# Altium footprint library HEF4071BP.PcbLib: 1 footprints
Each footprint in its own frame and in the unit in brackets; x right, y up, seen from the top. Pads: shape width x height; smd on the part's side, far side on the other; paste and mask are expansions set on the pad; w line width, h text height; cw(c..) or ccw(c..) is an arc to the next point about the centre after c.
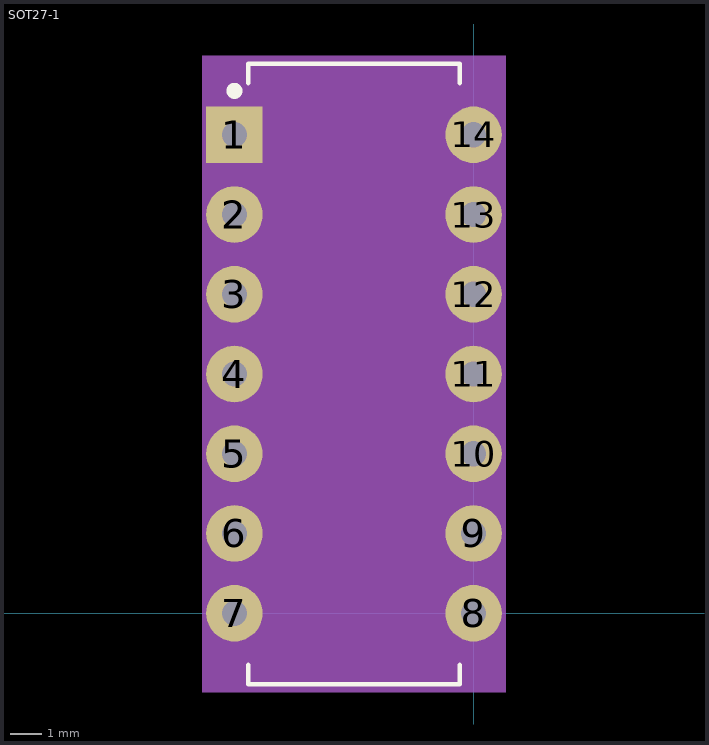
[diagram p0: the footprint, top view; thin cyan lines are the x and y axes]

## SOT27-1 [mm]
pads (14):
  rect 1.8x1.8 / inner rect 1.295x1.295 / far side rect 1.295x1.295 hole 0.8: 1(-7.62,15.24)
  round 1.8 / inner round 1.295 / far side round 1.295 hole 0.8: 2(-7.62,12.7) 3(-7.62,10.16) 4(-7.62,7.62) 5(-7.62,5.08) 6(-7.62,2.54) 7(-7.62,0) 8(0,0) 9(0,2.54) 10(0,5.08) 11(0,7.62) 12(0,10.16) 13(0,12.7) 14(0,15.24)
Top Overlay:
  circle w0.254: c-7.62,16.637 r0.127
  lines w0.152: -7.175,-1.651 -7.175,-2.261 -0.445,-2.261 -0.445,-1.651 ; -7.175,16.891 -7.175,17.501 -0.445,17.501 -0.445,16.891
Mechanical 5:
  region: 1.029,-2.515 -8.649,-2.515 -8.649,17.755 1.029,17.755
Mechanical 13:
  lines w0: -4.115,17.374 ccw(c-3.81,17.374) -3.505,17.374
  lines w0.025: -8.014,-0.394 -8.014,0.394 -7.048,0.394 -7.048,-0.394 -8.014,-0.394 ; -8.014,2.146 -8.014,2.934 -7.048,2.934 -7.048,2.146 -8.014,2.146 ; -8.014,4.686 -8.014,5.474 -7.048,5.474 -7.048,4.686 -8.014,4.686 ; -8.014,7.226 -8.014,8.014 -7.048,8.014 -7.048,7.226 -8.014,7.226 ; -8.014,9.766 -8.014,10.554 -7.048,10.554 -7.048,9.766 -8.014,9.766 ; -8.014,12.306 -8.014,13.094 -7.048,13.094 -7.048,12.306 -8.014,12.306 ; -8.014,14.846 -8.014,15.634 -7.048,15.634 -7.048,14.846 -8.014,14.846 ; -7.048,-2.134 -0.572,-2.134 -0.572,17.374 -7.048,17.374 -7.048,-2.134 ; -0.572,-0.394 -0.572,0.394 0.394,0.394 0.394,-0.394 -0.572,-0.394 ; -0.572,2.146 -0.572,2.934 0.394,2.934 0.394,2.146 -0.572,2.146 ; -0.572,4.686 -0.572,5.474 0.394,5.474 0.394,4.686 -0.572,4.686 ; -0.572,7.226 -0.572,8.014 0.394,8.014 0.394,7.226 -0.572,7.226 ; -0.572,9.766 -0.572,10.554 0.394,10.554 0.394,9.766 -0.572,9.766 ; -0.572,12.306 -0.572,13.094 0.394,13.094 0.394,12.306 -0.572,12.306 ; -0.572,14.846 -0.572,15.634 0.394,15.634 0.394,14.846 -0.572,14.846
  text "*" at -7.112,14.605 h1.27
Mechanical 15:
  region: -0.318,-0.787 0.902,-0.787 0.902,16.027 -0.318,16.027 -0.318,17.628 -7.302,17.628 -7.302,16.027 -8.522,16.027 -8.522,-0.787 -7.302,-0.787 -7.302,-2.388 -0.318,-2.388
  lines w0.152: -8.522,-0.787 -8.522,16.027 -7.302,16.027 -7.302,17.628 -0.318,17.628 -0.318,16.027 0.902,16.027 0.902,-0.787 -0.318,-0.787 -0.318,-2.388 -7.302,-2.388 -7.302,-0.787 -8.522,-0.787
3D body "SOT27-1.step": height 4.19, standoff -2.54, extent -7.874,-2.134 0.254,17.374
3D body: height 0.25, standoff 0, extent 0,0 0.254,0.254